# Altium schematic symbol library Capacitor.SchLib: 735 symbols (part 17 of 20)
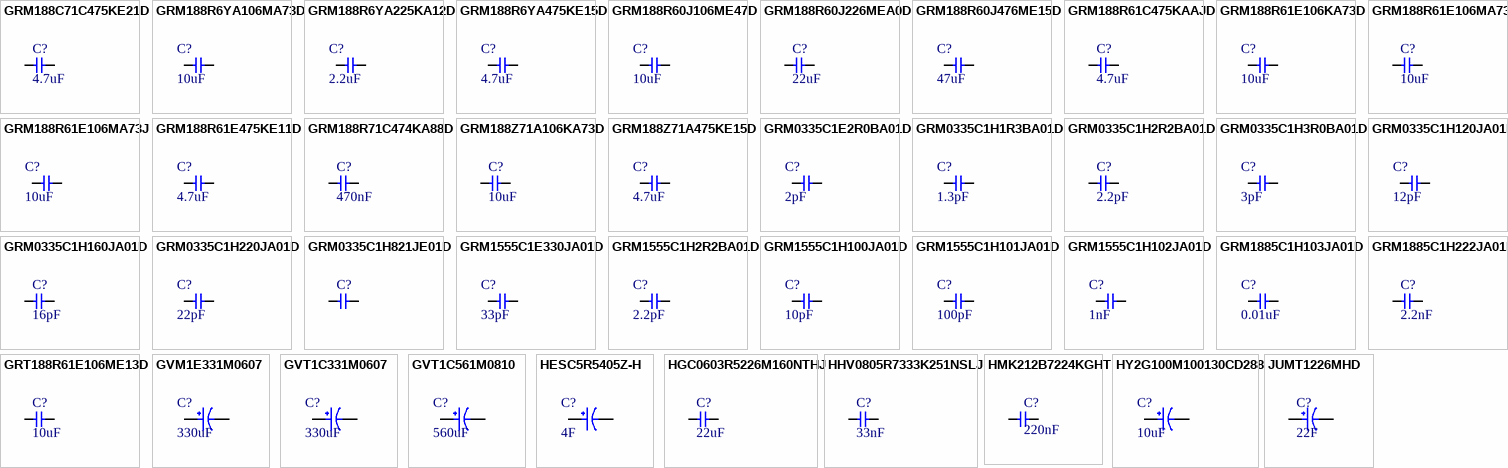
[diagram p34: symbols GRM188C71C475KE21D to JUMT1226MHD]

## GRM1555C1H101JA01D
designator C?, comment 100pF
CAP CER 100PF 50V C0G/NP0 0402; Manufacturer: Murata; Manufacturer Part Number: GRM1555C1H101JA01D; Material: Ceramic; Dielectric: C0G; Tolerance: 5%; Supplier 1: Mouser; RoHS: Yes; Category: Ceramic Capacitors; Stock 1: 2073105; Pricing 1: 1=0.10000, 10=0.01000, 50=0.01000, 100=0.00900, 500=0.00600, 1000=0.00500, 2500=0.00400, 10000=0.00300, 50000=0.00200 (USD); Mount: Surface Mount; Case/Package: 0402; Case Code (Metric): 1005; Case Code (Imperial): 0402; Min Operating Temperature: -55°C; Max Operating Temperature: 125°C; Voltage Rating: 50V; Capacitance: 100pF; Packaging: Tape and Reel; Package Quantity: 1; Voltage Rating (DC): 50V; Termination: SMD/SMT; Series: GRM; Construction: Flat; Voltage: 50V; Length: 1mm; Width: 0.02inch; Height: 0.5mm; Thickness: 0.022inch; Depth: 0.5mm; Radiation Hardening: No; REACH SVHC: No SVHC; Lead Free: Lead Free; RoHS Compliant: Yes; ComponentLink1URL: https://datasheet.ciiva.com/11786/0900766b80ef921d-11786069.pdf?src-supplier=RSComponents; ComponentLink1Description: https://datasheet.ciiva.com/11786/0900766b80ef921d-11786069.pdf?src-supplier=RSComponents; ComponentLink2URL: https://datasheet.ciiva.com/18184/getdatasheetpartid-199957-18184175.pdf?src-supplier=Verical; ComponentLink2Description: https://datasheet.ciiva.com/18184/getdatasheetpartid-199957-18184175.pdf?src-supplier=Verical; ComponentLink3URL: https://datasheet.ciiva.com/29200/453557-da-01-en-vs-kondensator-0402-29200111.pdf?src-supplier=Conrad; ComponentLink3Description: https://datasheet.ciiva.com/29200/453557-da-01-en-vs-kondensator-0402-29200111.pdf?src-supplier=Conrad; ComponentLink4URL: https://datasheet.ciiva.com/6271/partnumbering-e-01-6271071.pdf?src-supplier=Digi-Key; ComponentLink4Description: https://datasheet.ciiva.com/6271/partnumbering-e-01-6271071.pdf?src-supplier=Digi-Key; ComponentLink5URL: https://datasheet.ciiva.com/16440/product-16440566.pdf?src-supplier=Future+Electronics; ComponentLink5Description: https://datasheet.ciiva.com/16440/product-16440566.pdf?src-supplier=Future+Electronics; Supplier Part Number 1: 81-GRM1555C1H101JA1D; LCSC Part Number: C77177
footprint Cap-0402
pins: 1, 2

## GRM1555C1H102JA01D
designator C?, comment 1nF
CAP CER 1000PF 50V C0G/NP0 0402; Manufacturer: Murata; Manufacturer Part Number: GRM1555C1H102JA01D; Material: Ceramic; Tolerance: 5%; Dielectric: C0G; Insulation Resistance: 10GR; Temperature Coefficient: 30ppm/°C; Item Type: Capacitor; Supplier 1: Avnet; RoHS: Yes; Category: Ceramic Capacitors; Stock 1: 800000; Pricing 1: 10000=0.00648, 20000=0.00613, 40000=0.00578, 60000=0.00543, 80000=0.00508, 100000=0.00473, 1000000=0.00438 (USD); Mount: Surface Mount; Case/Package: 0402; Number of Pins: 2; Case Code (Metric): 1005; Case Code (Imperial): 0402; Dielectric Material: Ceramic; Min Operating Temperature: -55°C; Max Operating Temperature: 125°C; Package Quantity: 1; Capacitance: 1nF; Voltage Rating: 50V; Packaging: Tape and Reel; Voltage Rating (DC): 50V; Termination: SMD/SMT; Voltage: 50V; Series: GRM; Construction: Flat; Length: 1mm; Width: 0.5mm; Height: 0.5mm; Thickness: 0.022inch; Depth: 0.5mm; Size: 0.5mm; Radiation Hardening: No; Reach SVHC Compliant: Yes; Lead Free: Lead Free; RoHS Compliant: Yes; ComponentLink1URL: https://datasheet.ciiva.com/34302/1855908-34302849.pdf?src-supplier=Jameco; ComponentLink1Description: https://datasheet.ciiva.com/34302/1855908-34302849.pdf?src-supplier=Jameco; ComponentLink2URL: https://datasheet.ciiva.com/132/product-132800.pdf?src-supplier=Digi-Key; ComponentLink2Description: https://datasheet.ciiva.com/132/product-132800.pdf?src-supplier=Digi-Key; ComponentLink3URL: https://datasheet.ciiva.com/132/grm1555c1h102ja01-01-132799.pdf?src-supplier=Digi-Key; ComponentLink3Description: https://datasheet.ciiva.com/132/grm1555c1h102ja01-01-132799.pdf?src-supplier=Digi-Key; ComponentLink4URL: https://datasheet.ciiva.com/11786/0900766b807a1cab-11786727.pdf?src-supplier=RSComponents; ComponentLink4Description: https://datasheet.ciiva.com/11786/0900766b807a1cab-11786727.pdf?src-supplier=RSComponents; ComponentLink5URL: https://datasheet.ciiva.com/29200/453569-da-01-en-vs-kondensator-0402-29200121.pdf?src-supplier=Conrad; ComponentLink5Description: https://datasheet.ciiva.com/29200/453569-da-01-en-vs-kondensator-0402-29200121.pdf?src-supplier=Conrad; ComponentLink6URL: https://datasheet.ciiva.com/7828/4360-7828821.pdf?src-supplier=Element14; ComponentLink6Description: https://datasheet.ciiva.com/7828/4360-7828821.pdf?src-supplier=Element14; ComponentLink7URL: https://datasheet.ciiva.com/14116/grmseries-tc-hitype-eng-14116919.pdf?src-supplier=Distrelec; ComponentLink7Description: https://datasheet.ciiva.com/14116/grmseries-tc-hitype-eng-14116919.pdf?src-supplier=Distrelec; ComponentLink8URL: https://datasheet.ciiva.com/14116/grmseries-tc-hitype-eng-14116858.pdf?src-supplier=Distrelec; ComponentLink8Description: https://datasheet.ciiva.com/14116/grmseries-tc-hitype-eng-14116858.pdf?src-supplier=Distrelec; ComponentLink9URL: https://datasheet.ciiva.com/132/grm1555c1h102ja01-01-132801.pdf?src-supplier=Digi-Key; ComponentLink9Description: https://datasheet.ciiva.com/132/grm1555c1h102ja01-01-132801.pdf?src-supplier=Digi-Key; ComponentLink10URL: https://datasheet.ciiva.com/7828/1747436-7828822.pdf?src-supplier=Element14; ComponentLink10Description: https://datasheet.ciiva.com/7828/1747436-7828822.pdf?src-supplier=Element14; Supplier Part Number 1: GRM1555C1H102JA01D; LCSC Part Number: C76947
footprint Cap-0402
pins: 1, 2

## GRM1885C1H103JA01D
designator C?, comment 0.01uF
CAP CER 10000PF 50V C0G/NP0 0603; Manufacturer: Murata; Manufacturer Part Number: GRM1885C1H103JA01D; Material: Ceramic; Capacitance: 10nF; Tolerance: 5%; Dielectric: C0G; Supplier 1: RSComponents; RoHS: Yes; Category: Ceramic Capacitors; Stock 1: 80000; Pricing 1: 4000=0.03500, 8000=0.03200 (GBP); Mount: Surface Mount; Case/Package: 0603; Case Code (Metric): 1608; Case Code (Imperial): 0603; Min Operating Temperature: -55°C; Max Operating Temperature: 125°C; Packaging: Tape and Reel; Package Quantity: 4000; Voltage Rating: 50V; Voltage Rating (DC): 50V; Termination: SMD/SMT; Voltage: 50V; Series: GRM; Length: 1.6mm; Width: 0.8mm; Height: 0.8mm; Thickness: 0.035inch; Lead Pitch: 0.5mm; Depth: 0.8mm; REACH SVHC: No SVHC; Lead Free: Lead Free; RoHS Compliant: Yes; ComponentLink1URL: https://datasheet.ciiva.com/41860/partnumbering-e-01-41860759.pdf?src-supplier=Digi-Key; ComponentLink1Description: https://datasheet.ciiva.com/41860/partnumbering-e-01-41860759.pdf?src-supplier=Digi-Key; ComponentLink2URL: https://datasheet.ciiva.com/29537/partnumbering-e-01-29537910.pdf?src-supplier=Digi-Key; ComponentLink2Description: https://datasheet.ciiva.com/29537/partnumbering-e-01-29537910.pdf?src-supplier=Digi-Key; Supplier Part Number 1: 1449032
footprint Cap-0603
pins: 1, 2

## GRM1885C1H222JA01D
designator C?, comment 2.2nF
CAP CER 2200PF 50V C0G/NP0 0603; Manufacturer: Murata; Manufacturer Part Number: GRM1885C1H222JA01D; Item Type: Capacitors; Material: Ceramic; Tolerance: 5%; Dielectric: C0G; Insulation Resistance: 10GR; Temperature Coefficient: 30ppm/°C; Supplier: Mouser; LCSC Part Number: C77033; RoHS: Yes; Stock: 93842; Pricing: 1=0.1, 10=0.031, 50=0.031, 100=0.019, 1000=0.015, 10000=0.008 (USD); Mounting Technology: Surface Mount; Case/Package: 0603; Pins: 2; Case Code (Imperial): 0603; Case Code (Metric): 1608; Dielectric Material: Ceramic; Min Operating Temperature: -55°C; Max Operating Temperature: 125°C; Value: 2.2nF; Packaging: Tape and Reel; Voltage Rating: 50V; Voltage Rating (DC): 50V; Package Quantity: 1; Termination: SMD/SMT; Voltage: 50V; Series: GRM; Construction: Flat; Length: 1.6mm; Width: 0.031inch; Height: 0.8mm; Thickness: 0.035inch; Depth: 0.8mm; Reach SVHC Compliant: No; Lead Free: Lead Free; RoHS Compliant: Yes; ComponentLink1URL: https://datasheet.ciiva.com/11786/0900766b807a1cab-11786840.pdf?src-supplier=Rs; ComponentLink1Description: https://datasheet.ciiva.com/11786/0900766b807a1cab-11786840.pdf?src-supplier=Rs; ComponentLink2URL: https://datasheet.ciiva.com/3777/1632grm1885c1h222ja0123-3777835.pdf?src-supplier=Arrow+Electronics; ComponentLink2Description: https://datasheet.ciiva.com/3777/1632grm1885c1h222ja0123-3777835.pdf?src-supplier=Arrow+Electronics; ComponentLink3URL: https://datasheet.ciiva.com/6031/4360-6031797.pdf?src-supplier=Farnell; ComponentLink3Description: https://datasheet.ciiva.com/6031/4360-6031797.pdf?src-supplier=Farnell; ComponentLink4URL: https://datasheet.ciiva.com/7828/4360-7828918.pdf?src-supplier=Element14; ComponentLink4Description: https://datasheet.ciiva.com/7828/4360-7828918.pdf?src-supplier=Element14; ComponentLink5URL: https://datasheet.ciiva.com/133/partnumbering-e-01-133577.pdf?src-supplier=Digikey; ComponentLink5Description: https://datasheet.ciiva.com/133/partnumbering-e-01-133577.pdf?src-supplier=Digikey; ComponentLink6URL: https://datasheet.ciiva.com/133/partnumbering-e-01-133576.pdf?src-supplier=Digikey; ComponentLink6Description: https://datasheet.ciiva.com/133/partnumbering-e-01-133576.pdf?src-supplier=Digikey; ComponentLink7URL: https://datasheet.ciiva.com/133/partnumbering-e-01-133578.pdf?src-supplier=Digikey; ComponentLink7Description: https://datasheet.ciiva.com/133/partnumbering-e-01-133578.pdf?src-supplier=Digikey; ComponentLink8URL: https://datasheet.ciiva.com/7828/1747455-7828919.pdf?src-supplier=Element14; ComponentLink8Description: https://datasheet.ciiva.com/7828/1747455-7828919.pdf?src-supplier=Element14; ComponentLink9URL: https://datasheet.ciiva.com/7828/1747455-7828920.pdf?src-supplier=Element14; ComponentLink9Description: https://datasheet.ciiva.com/7828/1747455-7828920.pdf?src-supplier=Element14; ComponentLink10URL: https://datasheet.ciiva.com/11463/product-11463974.pdf?src-supplier=Avnet; ComponentLink10Description: https://datasheet.ciiva.com/11463/product-11463974.pdf?src-supplier=Avnet; ComponentLink11URL: https://datasheet.ciiva.com/2989/product-2989459.pdf?src-supplier=Avnet; ComponentLink11Description: https://datasheet.ciiva.com/2989/product-2989459.pdf?src-supplier=Avnet; ComponentLink12URL: https://datasheet.ciiva.com/29241/450664-da-01-en-vs-kondensator-0603-29241770.pdf?src-supplier=Conrad; ComponentLink12Description: https://datasheet.ciiva.com/29241/450664-da-01-en-vs-kondensator-0603-29241770.pdf?src-supplier=Conrad
footprint Cap-0603
pins: 1, 2

## GRT188R61E106ME13D
designator C?, comment 10uF
CAP CER 10UF 25V X5R 0603; Manufacturer: Murata; Manufacturer Part Number: GRT188R61E106ME13D; Item Type: Capacitors; Material: 4241ConductorMaterial; Tolerance: 20%; Supplier: Future Electronics; LCSC Part Number: C697423; RoHS: No; Stock: 444000; Pricing: 4000=0.0522, 8000=0.0514, 12000=0.0509, 20000=0.0503, 40000=0.049 (USD); Mounting Technology: Surface Mount; Case/Package: 0603; Case Code (Metric): 1608; Case Code (Imperial): 0603; Weight: 0.000917oz; Min Operating Temperature: -55°C; Max Operating Temperature: 85°C; Packaging: Cut Tape; Value: 10uF; Voltage Rating: 25V; Series: GRT; Termination: Standard; Voltage Rating (DC): 25V; Dielectric: X5R; Package Quantity: 4000; Length: 1.6mm; Width: 0.8mm; Height: 0.8mm; Ratings: AEC-Q200; RoHS Compliant: No; ComponentLink1URL: https://datasheet.octopart.com/GRT188R61E106ME13D-Murata-datasheet-149523595.pdf?src-supplier=Newark; ComponentLink1Description: https://datasheet.octopart.com/GRT188R61E106ME13D-Murata-datasheet-149523595.pdf?src-supplier=Newark; ComponentLink2URL: https://datasheet.octopart.com/GRT188R61E106ME13D-Murata-datasheet-82944876.pdf?src-supplier=Future+Electronics; ComponentLink2Description: https://datasheet.octopart.com/GRT188R61E106ME13D-Murata-datasheet-82944876.pdf?src-supplier=Future+Electronics; ComponentLink3URL: http://search.murata.co.jp/Ceramy/image/img/A01X/G101/ENG/GRT188R61E106ME13-01.pdf?src-supplier=Digikey; ComponentLink3Description: http://search.murata.co.jp/Ceramy/image/img/A01X/G101/ENG/GRT188R61E106ME13-01.pdf?src-supplier=Digikey; ComponentLink4URL: https://search.murata.co.jp/Ceramy/image/img/A01X/G101/ENG/GRT188R61E106ME13-01.pdf?src-supplier=Digikey; ComponentLink4Description: https://search.murata.co.jp/Ceramy/image/img/A01X/G101/ENG/GRT188R61E106ME13-01.pdf?src-supplier=Digikey; ComponentLink5URL: https://datasheet.octopart.com/GRT188R61E106ME13D-Murata-datasheet-165579666.pdf?src-supplier=TME; ComponentLink5Description: https://datasheet.octopart.com/GRT188R61E106ME13D-Murata-datasheet-165579666.pdf?src-supplier=TME
footprint Cap-0603
pins: 1, 2

## GVM1E331M0607
designator C?, comment 330uF
330uF ±20% 25V Aluminum Electrolytic Capacitors 2000hrs@105℃; Manufacturer: Honor Elec; Manufacturer Part Number: GVM1E331M0607; Package: SMD,D6.3xL7.7mm; Item Type: Capacitor; LCSC Part Number: C2980171
footprint GVM1E331M0607
pins: 1, 2

## GVT1C331M0607
designator C?, comment 330uF
330uF 16V ±20% SMD,D6.3xL7.7mm Aluminum Electrolytic Capacitors - SMD ROHS; Manufacturer: Honor Elec; Manufacturer Part Number: GVT1C331M0607; Package: SMD,D6.3xL7.7mm; LCSC Part Number: C2980164; Item Type: Capacitor; ComponentLink1Description: LCSC; ComponentLink1URL: https://www.lcsc.com/product-detail/Aluminum-Electrolytic-Capacitors-SMD_Honor-Elec-GVT1C331M0607_C2980164.html
footprint GVT1C331M0607
pins: 1, 2

## GVT1C561M0810
designator C?, comment 560uF
560uF 16V ±20% SMD,D8xL10.5mm Aluminum Electrolytic Capacitors - SMD ROHS; Manufacturer: Honor Elec; Manufacturer Part Number: GVT1C561M0810; Package: SMD,D8xL10.5mm; LCSC Part Number: C2980166; Item Type: Capacitor; ComponentLink1Description: LCSC; ComponentLink1URL: https://www.lcsc.com/product-detail/span-style-background-color-ff0-Aluminum-span-span-style-background-color-ff0-Electrolytic-span-span-style-background-color-ff0-Capacitors-span-span-style-background-color-ff0-SMD-span_Honor-Elec-GVT1C561M0810_C2980166.html
footprint GVT1C561M0810
pins: 1, 2

## HESC5R5405Z-H
designator C?, comment 4F
4F -20%~+80% 5.5V; Manufacturer: JGNE; Manufacturer Part Number: HESC5R5405Z-H; Package: Plug In; ComponentLink1Description: LCSC; ComponentLink1URL: https://item.szlcsc.com/3031082.html
footprint HESC5R5405Z-H
pins: 1, 2

## HGC0603R5226M160NTHJ
designator C?, comment 22uF
16V 22uF X5R ±20% 0603 Multilayer Ceramic Capacitors MLCC - SMD/SMT ROHS; Manufacturer: Chinocera; Manufacturer Part Number: HGC0603R5226M160NTHJ; Package: 0603; LCSC Part Number: C22367828; Item Type: Capacitor; ComponentLink1Description: LCSC; ComponentLink1URL: https://www.lcsc.com/product-detail/Multilayer-Ceramic-Capacitors-MLCC-SMD-SMT_Chinocera-HGC0603R5226M160NTHJ_C22367828.html
footprint Cap-0603
pins: 1, 2

## HHV0805R7333K251NSLJ
designator C?, comment 33nF
250V 33nF X7R 0805 Multilayer Ceramic Capacitors MLCC - SMD/SMT ROHS; Manufacturer: Chinocera; Manufacturer Part Number: HHV0805R7333K251NSLJ; Package: 0805; LCSC Part Number: C5186797; Item Type: Capacitor; ComponentLink1Description: LCSC; ComponentLink1URL: https://www.lcsc.com/product-detail/Multilayer-Ceramic-Capacitors-MLCC-SMD-SMT_Chinocera-HHV0805R7333K251NSLJ_C5186797.html
footprint Cap-0805 (SMD 0805)
pins: 1, 2

## HMK212B7224KGHT
designator C?, comment 220nF
CAP CER 0.22UF 100V X7R 0805; Item Type: Capacitor; Tolerance: 10%; LCSC Part Number: C2880358; ComponentLink1Description: LCSC; Supplier: Avnet; Supplier Part Number: HMK212B7224KGHT; RoHS: Yes; Category: Ceramic Capacitors; Stock: 138000; Pricing: 3000=0.05785, 6000=0.05655, 12000=0.05395, 18000=0.05265, 24000=0.04614 (USD); Mounting Technology: Surface Mount; Case/Package: 0805; Case Code (Imperial): 0805; Case Code (Metric): 2012; Min Operating Temperature: -55°C; Max Operating Temperature: 125°C; Value: 220nF; Packaging: Cut Tape; Voltage Rating: 100V; Voltage Rating (DC): 100V; Series: M; Length: 0.079inch; Width: 0.049inch; Thickness: 0.053inch; Ratings: AEC-Q200; Halogen Free: Halogen Free; RoHS Compliant: Yes; ComponentLink2URL: http://www.yuden.co.jp/ut/product/category/capacitor/putpdf/HMK212B7224KGHT.pdf?src-supplier=Avnet; ComponentLink2Description: http://www.yuden.co.jp/ut/product/category/capacitor/putpdf/HMK212B7224KGHT.pdf?src-supplier=Avnet; ComponentLink3URL: http://www.yuden.co.jp/productdata/catalog/en/mlcc_all_hq_e.pdf?src-supplier=Digi-Key; ComponentLink3Description: http://www.yuden.co.jp/productdata/catalog/en/mlcc_all_hq_e.pdf?src-supplier=Digi-Key; ComponentLink4URL: https://ds.yuden.co.jp/TYCOMPAS/ut/detail?pn=HMK212B7224KGHT  &amp;u=M&src-supplier=Digi-Key; ComponentLink4Description: https://ds.yuden.co.jp/TYCOMPAS/ut/detail?pn=HMK212B7224KGHT  &amp;u=M&src-supplier=Digi-Key; ComponentLink5URL: https://www.yuden.co.jp/productdata/catalog/mlcc06_hq_e.pdf?src-supplier=Digi-Key; ComponentLink5Description: https://www.yuden.co.jp/productdata/catalog/mlcc06_hq_e.pdf?src-supplier=Digi-Key; ComponentLink6URL: https://datasheet.octopart.com/HMK212B7224KGHT-Taiyo-Yuden-datasheet-154844355.pdf?src-supplier=Electro+Sonic; ComponentLink6Description: https://datasheet.octopart.com/HMK212B7224KGHT-Taiyo-Yuden-datasheet-154844355.pdf?src-supplier=Electro+Sonic
footprint Cap-0805 (SMD 0805)
pins: 1, 2

## HY2G100M100130CD288
designator C?, comment 10uF
10uF 400V 3.32Ω@100kHz ±20% 245mA@100kHz Plugin,D10xL13mm Aluminum Electrolytic Capacitors - Leaded ROHS; Manufacturer: HYNCDZ; Manufacturer Part Number: HY2G100M100130CD288; Package: Plugin,D10xL13mm; LCSC Part Number: C2841122; Item Type: Electrolytic Capacitor; ComponentLink1Description: LCSC; ComponentLink1URL: https://www.lcsc.com/product-detail/Aluminum-Electrolytic-Capacitors-Leaded_HYNCDZ-HY2G100M100130CD288_C2841122.html
footprint HY2G100M100130CD288
pins: 1, 2

## JUMT1226MHD
designator C?, comment 22F
CAP 22F 20% 2.7V T/H; Manufacturer: Nichicon; Manufacturer Part Number: JUMT1226MHD; Item Type: Capacitors; Supplier: Digikey; Supplier Part Number: 493-3296-ND; RoHS: Yes; Stock: 202; Pricing: 1=10.2, 10=7.172, 50=5.9434, 100=5.5593, 500=4.903, 1000=4.69759 (USD); ComponentLink1URL: https://datasheet.ciiva.com/4663/e-um-197115-4663491.pdf?src-supplier=Mouser; ComponentLink1Description: https://datasheet.ciiva.com/4663/e-um-197115-4663491.pdf?src-supplier=Mouser; ComponentLink2URL: https://datasheet.ciiva.com/3784/5electrolytic-double-layer-capacitors-e-3784061.pdf?src-supplier=Arrow+Electronics; ComponentLink2Description: https://datasheet.ciiva.com/3784/5electrolytic-double-layer-capacitors-e-3784061.pdf?src-supplier=Arrow+Electronics; ComponentLink3URL: https://datasheet.ciiva.com/11790/0900766b80ec956c-11790095.pdf?src-supplier=Rs; ComponentLink3Description: https://datasheet.ciiva.com/11790/0900766b80ec956c-11790095.pdf?src-supplier=Rs; ComponentLink4URL: https://datasheet.ciiva.com/15164/getdatasheetpartid-451591-15164678.pdf?src-supplier=Verical; ComponentLink4Description: https://datasheet.ciiva.com/15164/getdatasheetpartid-451591-15164678.pdf?src-supplier=Verical; ComponentLink5URL: https://datasheet.ciiva.com/2992/e-um-2992929.pdf?src-supplier=Avnet; ComponentLink5Description: https://datasheet.ciiva.com/2992/e-um-2992929.pdf?src-supplier=Avnet; ComponentLink6URL: https://datasheet.ciiva.com/238/e-um-238415.pdf?src-supplier=Digikey; ComponentLink6Description: https://datasheet.ciiva.com/238/e-um-238415.pdf?src-supplier=Digikey
footprint JUMT1226MHD
pins: 1, 2

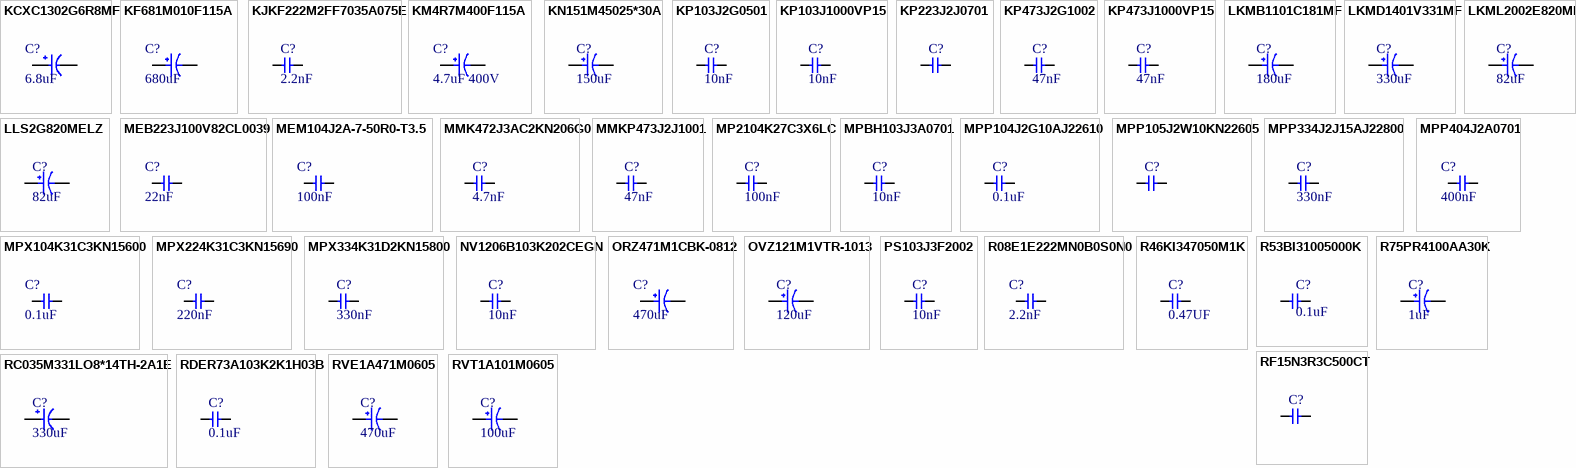
[diagram p15: symbols KCXC1302G6R8MF to RVT1A101M0605]

## KCXC1302G6R8MF
designator C?, comment 6.8uF
6.8uF 400V ±20% Plugin,D6.3xL13mm Aluminum Electrolytic Capacitors - Leaded ROHS; Manufacturer: Ymin; Manufacturer Part Number: KCXC1302G6R8MF; Package: Plugin,D6.3xL13mm; LCSC Part Number: C781275; Item Type: Capacitor; ComponentLink1Description: LCSC; ComponentLink1URL: https://www.lcsc.com/product-detail/Aluminum-Electrolytic-Capacitors-Leaded_Ymin-KCXC1302G6R8MF_C781275.html
footprint KCXC1302G6R8MF
pins: 1, 2

## KF681M010F115A
designator C?, comment 680uF
680uF 10V ±20% Plugin,D8xL11.5mm Aluminum Electrolytic Capacitors - Leaded ROHS; Manufacturer: Capxon International Elec; Manufacturer Part Number: KF681M010F115A; Package: Plugin,D8xL11.5mm; LCSC Part Number: C89787; Item Type: Electrolytic Capacitor; ComponentLink1Description: LCSC; ComponentLink1URL: https://www.lcsc.com/product-detail/Aluminum-Electrolytic-Capacitors-Leaded_Capxon-International-Elec-KF681M010F115A_C89787.html
footprint KF681M010F115A
pins: 1, 2

## KJKF222M2FF7035A075E
designator C?, comment 2.2nF
2.2nF ±20% Y2 300V Plugin,P=7.5mm Safety Capacitors ROHS; Manufacturer: KNSCHA; Manufacturer Part Number: KJKF222M2FF7035A075E; Supplier: LCSC; LCSC Part Number: C2803195; RoHS: No; Item Type: Capacitor
footprint KJKF222M2FF7035A075E
pins: 1, 2

## KM4R7M400F115A
designator C?, comment 4.7uF 400V
4.7uF 400V ±20% Plugin,D8xL11.5mm Aluminum Electrolytic Capacitors - Leaded ROHS; Manufacturer: Capxon International Elec; Manufacturer Part Number: KM4R7M400F115A; ComponentLink2URL: https://www.lcsc.com/product-detail/Aluminum-Electrolytic-Capacitors-Leaded_Capxon-International-Elec-KM4R7M400F115A_C59418.html; ComponentLink2Description: LCSC; LCSC Part Number: C59418; Item Type: Capacitor; Package: Plugin,D8xL11.5mm
footprint Plugin,D8xL11.5mm
pins: 1, 2

## KN151M45025*30A
designator C?, comment 150uF
20% 900mA@120Hz 10mm 450V 150uF Plugin,D25xL30mm Horn-Type Electrolytic Capacitors ROHS; Manufacturer: KFSON; Manufacturer Part Number: KN151M45025*30A; Package: Plugin,D25xL30mm; LCSC Part Number: C513373; Item Type: Capacitor; ComponentLink1Description: LCSC; ComponentLink1URL: https://www.lcsc.com/product-detail/Horn-Type-Electrolytic-Capacitors_KFSON-KN151M45025-30A_C513373.html
footprint KN151M45025*30A
pins: 1, 2

## KP103J2G0501
designator C?, comment 10nF
10nF -40℃~+100℃ ±5% 400V Plugin,P=5mm Polypropylene Film Capacitors (CBB) ROHS; Manufacturer: KYET; Manufacturer Part Number: KP103J2G0501; Package: Plugin,P=5mm; LCSC Part Number: C3019055; Item Type: Capacitor; ComponentLink1Description: LCSC; ComponentLink1URL: https://www.lcsc.com/product-detail/Polypropylene-Film-Capacitors-CBB_KYET-KP103J2G0501_C3019055.html
footprint KP103J2G0501
pins: 1, 2

## KP103J1000VP15
designator C?, comment 10nF
10nF -40℃~+105℃ ±5% 1kV Plugin,P=15mm Polypropylene Film Capacitors (CBB) ROHS; Manufacturer: KYET; Manufacturer Part Number: KP103J1000VP15; Package: Plugin,P=15mm; LCSC Part Number: C390160; Item Type: Capacitor; ComponentLink1Description: LCSC; ComponentLink1URL: https://www.lcsc.com/product-detail/Polypropylene-Film-Capacitors-CBB_KYET-KP103J1000VP15_C390160.html
footprint KP103J1000VP15
pins: 1, 2

## KP223J2J0701
designator C?
22nF -40℃~+100℃ ±5% 630V Plugin,P=7.5mm Polypropylene Film Capacitors (CBB) ROHS; Manufacturer: KYET; Manufacturer Part Number: KP223J2J0701; Package: Plugin,P=7.5mm; LCSC Part Number: C390073; Item Type: Capacitor; ComponentLink1Description: LCSC; ComponentLink1URL: https://www.lcsc.com/product-detail/Polypropylene-Film-Capacitors-CBB_KYET-KP223J2J0701_C390073.html
footprint KP223J2J0701
pins: 1, 2

## KP473J2G1002
designator C?, comment 47nF
47nF -40℃~+100℃ ±5% 400V Plugin,P=10mm Polypropylene Film Capacitors (CBB) ROHS; Manufacturer: KYET; Manufacturer Part Number: KP473J2G1002; Package: Plugin,P=10mm; LCSC Part Number: C3019043; Item Type: Capacitor; ComponentLink1Description: LCSC; ComponentLink1URL: https://www.lcsc.com/product-detail/Polypropylene-Film-Capacitors-CBB_KYET-KP473J2G1002_C3019043.html
footprint KP104J2G1016
pins: 1, 2

## KP473J1000VP15
designator C?, comment 47nF
47nF -40℃~+105℃ ±5% 1kV Plugin,P=15mm Polypropylene Film Capacitors (CBB) ROHS; Manufacturer: KYET; Manufacturer Part Number: KP473J1000VP15; Package: Plugin,P=15mm; LCSC Part Number: C390164; Item Type: Capacitors; ComponentLink1Description: LCSC; ComponentLink1URL: https://www.lcsc.com/product-detail/Polypropylene-Film-Capacitors-CBB_KYET-KP473J1000VP15_C390164.html
footprint KP473J1000VP15
pins: 1, 2

## LKMB1101C181MF
designator C?, comment 180uF
180uF 16V ±20% Plugin,D5xL11mm Aluminum Electrolytic Capacitors - Leaded ROHS; Manufacturer: Ymin; Manufacturer Part Number: LKMB1101C181MF; Supplier: LCSC; LCSC Part Number: C442570; RoHS: No; Item Type: Capacitor
footprint Plugin,D5xL11mm
pins: 1, 2

## LKMD1401V331MF
designator C?, comment 330uF
330uF 35V 90mΩ@100kHz ±20% 1.33A@100kHz Plugin,D8xL14mm Aluminum Electrolytic Capacitors - Leaded ROHS; Manufacturer: Ymin; Manufacturer Part Number: LKMD1401V331MF; Package: Plugin,D8xL14mm; LCSC Part Number: C442875; Item Type: Capacitor; ComponentLink1Description: LCSC; ComponentLink1URL: https://www.lcsc.com/product-detail/Aluminum-Electrolytic-Capacitors-Leaded_Ymin-LKMD1401V331MF_C442875.html
footprint LKMD1401V331MF
pins: 1, 2

## LKML2002E820MF
designator C?, comment 82uF
82uF 250V 1.35Ω@100kHz ±20% 1.27A@100kHz Plugin,D12.5xL20mm Aluminum Electrolytic Capacitors - Leaded ROHS; Manufacturer: Ymin; Manufacturer Part Number: LKML2002E820MF; Package: Plugin,D12.5xL20mm; LCSC Part Number: C443261; Item Type: Capacitor; ComponentLink1Description: LCSC; ComponentLink1URL: https://www.lcsc.com/product-detail/Aluminum-Electrolytic-Capacitors-Leaded_Ymin-LKML2002E820MF_C443261.html
footprint LKML2002E820MF
pins: 1, 2

## LLS2G820MELZ
designator C?, comment 82uF
CAP ALUM 82UF 20% 400V SNAP TH; Manufacturer: Nichicon; Manufacturer Part Number: LLS2G820MELZ; Item Type: Capacitor; Supplier: Mouser; LCSC Part Number: C2757944; RoHS: Yes; Stock: 93; Pricing: 1=3.28, 10=2.24, 50=2.05, 100=1.69, 1000=1.37, 10000=1.26 (USD); ComponentLink1URL: https://datasheet.ciiva.com/117/e-ls-117372.pdf?src-supplier=Digikey; ComponentLink1Description: https://datasheet.ciiva.com/117/e-ls-117372.pdf?src-supplier=Digikey; ComponentLink2URL: https://datasheet.ciiva.com/11684/e-ls-11684296.pdf?src-supplier=Avnet; ComponentLink2Description: https://datasheet.ciiva.com/11684/e-ls-11684296.pdf?src-supplier=Avnet
footprint LLS2G820MELZ
pins: 1, 2

## MEB223J100V82CL0039
designator C?, comment 22nF
±5% 100V 22nF -40℃~+110℃ Metallized Polyester Plugin,P=5mm Film Capacitors ROHS; Manufacturer: KNSCHA; Manufacturer Part Number: MEB223J100V82CL0039; Package: Plugin,P=5mm; LCSC Part Number: C2833307; Item Type: Capacitors; ComponentLink1Description: LCSC; ComponentLink1URL: https://www.lcsc.com/product-detail/Film-Capacitors_KNSCHA-MEB223J100V82CL0039_C2833307.html
footprint MEB223J100V82CL0039
pins: 1, 2

## MEM104J2A-7-50R0-T3.5
designator C?, comment 100nF
100nF ±5% 100V Plugin,P=5mm Polypropylene Film Capacitors (CBB) ROHS; Manufacturer: Hongzhi Elec; Manufacturer Part Number: MEM104J2A-7-50R0-T3.5; Package: Plugin,P=5mm; LCSC Part Number: C333838; Item Type: Capacitor; ComponentLink1Description: LCSC; ComponentLink1URL: https://www.lcsc.com/product-detail/Polypropylene-Film-Capacitors-span-style-background-color-ff0-CBB-span_Hongzhi-Elec-MEM104J2A-7-50R0-T3-5_C333838.html
footprint MEM104J2A-7-50R0-T3.5
pins: 1, 2

## MMK472J3AC2KN206G0
designator C?, comment 4.7nF
4.7nF -40℃~+105℃ ±5% 1kV Plugin,P=10mm Polypropylene Film Capacitors (CBB) ROHS; Manufacturer: KNSCHA; Manufacturer Part Number: MMK472J3AC2KN206G0; Package: Plugin,P=10mm; LCSC Part Number: C2998032; Item Type: Capacitor; ComponentLink1Description: LCSC; ComponentLink1URL: https://www.lcsc.com/product-detail/Polypropylene-Film-Capacitors-CBB_KNSCHA-MMK472J3AC2KN206G0_C2998032.html
footprint MMK472J3AC2KN206G0
pins: 1, 2

## MMKP473J2J1001
designator C?, comment 47nF
47nF -40℃~+105℃ ±5% 630V Plugin,P=10mm Polypropylene Film Capacitors (CBB) ROHS; Manufacturer: KYET; Manufacturer Part Number: MMKP473J2J1001; Supplier: LCSC; LCSC Part Number: C484939; Item Type: Capacitor; Stock: 4295; Pricing: 5=0.1166, 50=0.0957, 150=0.0852, 500=0.0684, 2500=0.0622, 5000=0.059 (USD); ComponentLink1Description: New link; ComponentLink1URL: https://www.lcsc.com/product-detail/Polypropylene-Film-Capacitors-CBB_KYET-MMKP473J2J1001_C484939.html
footprint MMKP473J2J1001
pins: 1, 2

## MP2104K27C3X6LC
designator C?, comment 100nF
100nF ±10% X2 275V Plugin,P=10mm Safety Capacitors ROHS; Manufacturer: SRD(Shenzhen Sincerity Tech); Manufacturer Part Number: MP2104K27C3X6LC; Package: Plugin,P=10mm; LCSC Part Number: C105759; Item Type: Capacitor; ComponentLink1Description: LCSC; ComponentLink1URL: https://www.lcsc.com/product-detail/Safety-Capacitors_SRD-Shenzhen-Sincerity-Tech-MP2104K27C3X6LC_C105759.html
footprint MP2104K27C3X6LC
pins: 1, 2

## MPBH103J3A0701
designator C?, comment 10nF
10nF -40℃~+100℃ ±5% 1kV Through Hole,P=7.5mm Film Capacitors RoHS; Manufacturer: KYET; Manufacturer Part Number: MPBH103J3A0701; Package: Through Hole,P=7.5mm; LCSC Part Number: C2928848; Item Type: Capacitor; ComponentLink1Description: LCSC; ComponentLink1URL: https://www.lcsc.com/product-detail/C2928848.html
footprint MPBH103J3A0701
pins: 1, 2

## MPP104J2G10AJ22610
designator C?, comment 0.1uF
0.1uF -40℃~+105℃ ±5% 400V Plugin,P=10mm Polypropylene Film Capacitors (CBB) ROHS; Manufacturer: KNSCHA; Manufacturer Part Number: MPP104J2G10AJ22610; Package: Plugin,P=10mm; LCSC Part Number: C5263846; Item Type: Capacitor; ComponentLink1Description: LCSC; ComponentLink1URL: https://www.lcsc.com/product-detail/Polypropylene-Film-Capacitors-CBB_KNSCHA-MPP104J2G10AJ22610_C5263846.html
footprint MPP104J2G10AJ22610
pins: 1, 2

## MPP105J2W10KN22605
designator C?
1uF -40℃~+105℃ ±5% 450V Plugin,P=10mm Polypropylene Film Capacitors (CBB) ROHS; Manufacturer: KNSCHA; Manufacturer Part Number: MPP105J2W10KN22605; Supplier: LCSC; LCSC Part Number: C2686214; RoHS: No; Item Type: Capacitor
footprint MPP105J2W10KN22605
pins: 1, 2

## MPP334J2J15AJ22800
designator C?, comment 330nF
330nF -40℃~+105℃ ±5% 630V Plugin,P=15mm Polypropylene Film Capacitors (CBB) ROHS; Manufacturer: KNSCHA; Manufacturer Part Number: MPP334J2J15AJ22800; Supplier: LCSC; LCSC Part Number: C506837; RoHS: No; Item Type: Capacitors
footprint MPP334J2J15AJ22800
pins: 1, 2

## MPP404J2A0701
designator C?, comment 400nF
400nF -40℃~+105℃ ±5% 100V Plugin,P=7.5mm Polypropylene Film Capacitors (CBB) ROHS; Manufacturer: KYET; Manufacturer Part Number: MPP404J2A0701; Package: Plugin,P=7.5mm; LCSC Part Number: C484926; Item Type: Capacitor; ComponentLink1Description: LCSC; ComponentLink1URL: https://lcsc.com/product-detail/Polypropylene-Film-Capacitors-CBB_KYET-MPP404J2A0701_C484926.html
footprint MPP404J2A0701
pins: 1, 2

## MPX104K31C3KN15600
designator C?, comment 0.1uF
100nF ±10% X2 Plugin,P=10mm Suppression Capacitors ROHS; Manufacturer: KNSCHA; Manufacturer Part Number: MPX104K31C3KN15600; Package: Plugin,P=10mm; LCSC Part Number: C489079; Item Type: Capacitor; ComponentLink1Description: LCSC; ComponentLink1URL: https://www.lcsc.com/product-detail/Suppression-Capacitors_KNSCHA-MPX104K31C3KN15600_C489079.html
footprint MPX104K31C3KN15600
pins: 1, 2

## MPX224K31C3KN15690
designator C?, comment 220nF
220nF ±10% X2 Plugin,P=10mm Suppression Capacitors ROHS; Manufacturer: KNSCHA; Manufacturer Part Number: MPX224K31C3KN15690; Package: Plugin,P=10mm; LCSC Part Number: C504197; Item Type: Suppression Capacitor; ComponentLink1Description: LCSC; ComponentLink1URL: https://www.lcsc.com/product-detail/Suppression-Capacitors_KNSCHA-MPX224K31C3KN15690_C504197.html
footprint MPX224K31C3KN15690
pins: 1, 2

## MPX334K31D2KN15800
designator C?, comment 330nF
330nF ±10% X2 Plugin,P=15mm Safety Capacitors ROHS; Manufacturer: KNSCHA; Manufacturer Part Number: MPX334K31D2KN15800; Package: Plugin,P=15mm; LCSC Part Number: C504201; Item Type: Capacitor; ComponentLink1Description: LCSC; ComponentLink1URL: https://www.lcsc.com/product-detail/Safety-Capacitors_KNSCHA-MPX334K31D2KN15800_C504201.html
footprint MPX334K31D2KN15800
pins: 1, 2

## NV1206B103K202CEGN
designator C?, comment 10nF
2kV 10nF ±10% 1206 Multilayer Ceramic Capacitors MLCC - SMD/SMT ROHS; Manufacturer: HUI JU; Manufacturer Part Number: NV1206B103K202CEGN; Package: 1206; LCSC Part Number: C976252; Item Type: Capacitor; ComponentLink1Description: LCSC; ComponentLink1URL: https://www.lcsc.com/product-detail/Multilayer-Ceramic-Capacitors-MLCC-SMD-SMT_HUI-JU-NV1206B103K202CEGN_C976252.html
footprint Cap-1206 (SMD 1206)
pins: 1, 2

## ORZ471M1CBK-0812
designator C?, comment 470uF
Cap Alum 470UF 16V 20% 2000LHRS 8 X 12; Manufacturer: Lelon; Manufacturer Part Number: ORZ471M1CBK-0812; Item Type: Capacitor; Supplier 1: Mouser; RoHS: Yes; Category: Uncategorized; Case/Package: Aluminum; Min Operating Temperature: -55°C; Max Operating Temperature: 105°C; Value: 470uF; Package Quantity: 500; Packaging: Bulk; Voltage Rating: 16V; Voltage Rating (DC): 16V; Tolerance: 20%; Termination: Radial; Length: 12mm; Lead Pitch: 3.5mm; ComponentLink1URL: http://www.lelon.com.tw/down.php?f=/file/3.pdf&n=OCRZ.pdf&src-supplier=Mouser; ComponentLink1Description: http://www.lelon.com.tw/down.php?f=/file/3.pdf&n=OCRZ.pdf&src-supplier=Mouser; Supplier Part Number 1: 140-ORZ471M1CBK0812; LCSC Part Number: C311633
footprint ORZ471M1CBK-0812
pins: 1, 2

## OVZ121M1VTR-1013
designator C?, comment 120uF
35V 120uF ±20% 4.4A@100kHz SMD,D10xL12.6mm Polymer Aluminum Capacitors ROHS; Manufacturer: Lelon; Manufacturer Part Number: OVZ121M1VTR-1013; Package: SMD,D10xL12.6mm; LCSC Part Number: C250089; Item Type: Capacitor; ComponentLink1Description: LCSC; ComponentLink1URL: https://www.lcsc.com/product-detail/Polymer-Aluminum-Capacitors_Lelon-OVZ121M1VTR-1013_C250089.html
footprint OVZ121M1VTR-1013
pins: 1, 2

## PS103J3F2002
designator C?, comment 10nF
10nF -40℃~+100℃ ±5% 2kV Plugin,P=20mm Polypropylene Film Capacitors (CBB) ROHS; Manufacturer: KYET; Manufacturer Part Number: PS103J3F2002; Package: Plugin,P=20mm; LCSC Part Number: C524425; Item Type: Capacitor; ComponentLink1Description: LCSC; ComponentLink1URL: https://www.lcsc.com/product-detail/Polypropylene-Film-Capacitors-CBB_KYET-PS103J3F2002_C524425.html
footprint PS103J3F2002
pins: 1, 2

## R08E1E222MN0B0S0N0
designator C?, comment 2.2nF
±20% 2.2nF Y5U 2kV Plugin,P=7.5mm Ceramic Disc Capacitors ROHS; Manufacturer: STE; Manufacturer Part Number: R08E1E222MN0B0S0N0; Package: Plugin,P=7.5mm; LCSC Part Number: C2914748; Item Type: Ceramic Disc Capacitor; ComponentLink1Description: LCSC; ComponentLink1URL: https://www.lcsc.com/product-detail/Ceramic-Disc-Capacitors_STE-Songtian-Elec-R08E1E222MN0B0S0N0_C2914748.html
footprint R08E1E222MN0B0S0N0
pins: 1, 2

## R46KI347050M1K
designator C?, comment 0.47UF
CAP FILM 0.47UF 10% 560VDC RAD; Manufacturer: KEMET; Manufacturer Part Number: R46KI347050M1K; Item Type: Capacitor; Lead Length: 25mm; Supplier: Mouser; LCSC Part Number: C696791; RoHS: Yes; Stock: 2256; Pricing: 1=0.88, 10=0.633, 50=0.633, 100=0.493, 1000=0.421, 10000=0.322 (USD); Pins: 2NUMBER; ComponentLink1URL: http://components.arrow.com/part/dataview/47471301S8592209N7429?src-supplier=Arrow+Electronics; ComponentLink1Description: http://components.arrow.com/part/dataview/47471301S8592209N7429?src-supplier=Arrow+Electronics; ComponentLink2URL: http://datasheet.octopart.com/R46KI347050M1K-Kemet-datasheet-5313608.pdf?src-supplier=Mouser; ComponentLink2Description: http://datasheet.octopart.com/R46KI347050M1K-Kemet-datasheet-5313608.pdf?src-supplier=Mouser; ComponentLink3URL: https://datasheet.octopart.com/R46KI347050M1K-Kemet-datasheet-5313608.pdf?src-supplier=Element14; ComponentLink3Description: https://datasheet.octopart.com/R46KI347050M1K-Kemet-datasheet-5313608.pdf?src-supplier=Element14; ComponentLink4URL: http://datasheet.octopart.com/R46KI347050M1K-Kemet-datasheet-5313608.pdf?src-supplier=Newark; ComponentLink4Description: http://datasheet.octopart.com/R46KI347050M1K-Kemet-datasheet-5313608.pdf?src-supplier=Newark; ComponentLink5URL: http://datasheet.octopart.com/R46KI347050M1K-Kemet-datasheet-5313608.pdf?src-supplier=Distrelec; ComponentLink5Description: http://datasheet.octopart.com/R46KI347050M1K-Kemet-datasheet-5313608.pdf?src-supplier=Distrelec; ComponentLink6URL: https://api.kemet.com/component-edge/download/datasheet/R46KI347050M1K.pdf?src-supplier=Digikey; ComponentLink6Description: https://api.kemet.com/component-edge/download/datasheet/R46KI347050M1K.pdf?src-supplier=Digikey; ComponentLink7URL: http://datasheet.octopart.com/R46KI347050M1K-Kemet-datasheet-5313608.pdf?src-supplier=Avnet; ComponentLink7Description: http://datasheet.octopart.com/R46KI347050M1K-Kemet-datasheet-5313608.pdf?src-supplier=Avnet; ComponentLink8URL: http://datasheet.octopart.com/R46KI347050M1K-Kemet-datasheet-5313608.pdf?src-supplier=Farnell; ComponentLink8Description: http://datasheet.octopart.com/R46KI347050M1K-Kemet-datasheet-5313608.pdf?src-supplier=Farnell; ComponentLink9URL: http://datasheet.octopart.com/R46KI347050M1K-Kemet-datasheet-5313608.pdf?src-supplier=Arrow+Electronics; ComponentLink9Description: http://datasheet.octopart.com/R46KI347050M1K-Kemet-datasheet-5313608.pdf?src-supplier=Arrow+Electronics; ComponentLink10URL: http://datasheet.octopart.com/R46KI347050M1K-Kemet-datasheet-5313608.pdf?src-supplier=Onlinecomponents.com; ComponentLink10Description: http://datasheet.octopart.com/R46KI347050M1K-Kemet-datasheet-5313608.pdf?src-supplier=Onlinecomponents.com; ComponentLink11URL: http://datasheet.octopart.com/R46KI347050M1K-Kemet-datasheet-5313608.pdf?src-supplier=Verical; ComponentLink11Description: http://datasheet.octopart.com/R46KI347050M1K-Kemet-datasheet-5313608.pdf?src-supplier=Verical; ComponentLink12URL: http://datasheet.octopart.com/R46KI347050M1K-Kemet-datasheet-5313608.pdf?src-supplier=LCSC; ComponentLink12Description: http://datasheet.octopart.com/R46KI347050M1K-Kemet-datasheet-5313608.pdf?src-supplier=LCSC; ComponentLink13URL: https://datasheet.octopart.com/R46KI347050M1K-Kemet-datasheet-67199277.pdf?src-supplier=TME; ComponentLink13Description: https://datasheet.octopart.com/R46KI347050M1K-Kemet-datasheet-67199277.pdf?src-supplier=TME; ComponentLink14URL: http://datasheet.octopart.com/R46KI347050M1K-Kemet-datasheet-5313608.pdf?src-supplier=Electro+Sonic; ComponentLink14Description: http://datasheet.octopart.com/R46KI347050M1K-Kemet-datasheet-5313608.pdf?src-supplier=Electro+Sonic
footprint R46KI347050M1K
pins: 1, 2

## R53BI31005000K
designator C?, comment 0.1uF
CAP FILM 0.1UF 10% 800VDC RADIAL; Item Type: Capacitor; ComponentLink1Description: LCSC; Supplier: Mouser; Supplier Part Number: 80-R53BI31005000K; RoHS: No; Stock: 1560; Pricing: 1=0.79, 10=0.503, 50=0.503, 100=0.429, 1000=0.295, 10000=0.256 (USD)
footprint R53BI31005000K
pins: 1, 2

## R75PR4100AA30K
designator C?, comment 1uF
Cap Film 0.47uF 305VAC PET 20% (26.5 X 8.5 X 16.5mm) Radial 22.5mm 105°C Bulk; Manufacturer: KEMET; Manufacturer Part Number: R75PR4100AA30K; Item Type: Capacitors; Dielectric Material: Polyester; Value: 470nF; Ratings: AEC-Q200,X2; Supplier: Mouser; Supplier Part Number: 80-R75PR4100AA30K; RoHS: Yes; Stock: 3429; Pricing: 1=1.83, 10=1.31, 50=1.03, 100=0.854, 1000=0.846, 10000=0.846 (USD); ComponentLink1URL: https://datasheet.ciiva.com/13404/kem-f3106-r75-364632-13404539.pdf?src-supplier=Mouser; ComponentLink1Description: https://datasheet.ciiva.com/13404/kem-f3106-r75-364632-13404539.pdf?src-supplier=Mouser; Category: Film Capacitors; Case/Package: Radial; Series: B32933; Termination: PC Pins; RoHS Compliant: Yes; ComponentLink2URL: https://en.tdk.eu/inf/20/20/ds/MKT_B32932_936.pdf?src-supplier=Digikey; ComponentLink2Description: https://en.tdk.eu/inf/20/20/ds/MKT_B32932_936.pdf?src-supplier=Digikey
footprint R75PR4100AA30K
pins: 1, 2

## RC035M331LO8*14TH-2A1E
designator C?, comment 330uF
330uF 35V ±20% 860mA@100kHz Plugin,D8xL14mm Aluminum Electrolytic Capacitors - Leaded ROHS; Manufacturer: BERYL Electronic Tech; Manufacturer Part Number: RC035M331LO8*14TH-2A1E; Package: Plugin,D8xL14mm; LCSC Part Number: C357626; Item Type: Capacitor; ComponentLink1Description: LCSC; ComponentLink1URL: https://www.lcsc.com/product-detail/Aluminum-Electrolytic-Capacitors-Leaded_BERYL-Electronic-Tech-RC035M331LO8-14TH-2A1E_C357626.html
footprint RC035M331LO8*14TH-2A1E
pins: 1, 2

## RDER73A103K2K1H03B
designator C?, comment 0.1uF
CAP CER 10000PF 1KV X7R RADIAL; Manufacturer: Murata; Manufacturer Part Number: RDER73A103K2K1H03B; Item Type: Capacitors; Material: 4241ConductorMaterial; Dielectric: 1511DielectricType; Supplier: Digikey; LCSC Part Number: C162686; RoHS: Yes; Stock: 415; Pricing: 1=0.82, 10=0.574, 50=0.483, 100=0.3934, 500=0.3278, 1000=0.27604, 2500=0.25879, 5000=0.24154 (USD); Voltage Rating (DC): 1kV; Width: 4mm; Height: 6mm; ComponentLink1URL: https://search.murata.co.jp/Ceramy/image/img/A01X/partnumbering_e_03.pdf?src-supplier=Digikey; ComponentLink1Description: https://search.murata.co.jp/Ceramy/image/img/A01X/partnumbering_e_03.pdf?src-supplier=Digikey; ComponentLink2URL: https://datasheet.octopart.com/RDER73A103K2K1H03B-Murata-datasheet-166166232.pdf?src-supplier=TME; ComponentLink2Description: https://datasheet.octopart.com/RDER73A103K2K1H03B-Murata-datasheet-166166232.pdf?src-supplier=TME
footprint RDER73A103K2K1H03B
pins: 1, 2

## RF15N3R3C500CT
designator C?
CAP CER 3.3PF 50V C0G/NP0 0402; Manufacturer: Walsin Tech Corp; Manufacturer Part Number: RF15N3R3C500CT; Item Type: Capacitor; Package: 0402; LCSC Part Number: C172822; ComponentLink1Description: LCSC; ComponentLink1URL: https://www.lcsc.com/product-detail/Multilayer-Ceramic-Capacitors-MLCC-SMD-SMT_Walsin-Tech-Corp-RF15N3R3C500CT_C172822.html
footprint Cap-0402
pins: 1, 2

## RVE1A471M0605
designator C?, comment 470uF
470uF 10V 220mA@120Hz 450mΩ ±20% SMD,D6.3xL5.8mm Aluminum Electrolytic Capacitors - SMD ROHS; Manufacturer: Roqang; Manufacturer Part Number: RVE1A471M0605; Supplier: LCSC; LCSC Part Number: C7465562; RoHS: No; ComponentLink1Description: LCSC; ComponentLink1URL: https://www.lcsc.com/product-detail/Aluminum-Electrolytic-Capacitors-SMD_ROQANG-RVE1A471M0605_C7465562.html
footprint RVE1A471M0605
pins: 1, 2

## RVT1A101M0605
designator C?, comment 100uF
100uF 10V 55mA@120Hz ±20% SMD,D6.3xL5.4mm Aluminum Electrolytic Capacitors - SMD ROHS; Manufacturer: ROQANG; Manufacturer Part Number: RVT1A101M0605; Package: SMD,D6.3xL5.4mm; LCSC Part Number: C72474; Item Type: Capacitor; ComponentLink1Description: LCSC; ComponentLink1URL: https://www.lcsc.com/product-detail/Aluminum-Electrolytic-Capacitors-SMD_ROQANG-RVT1A101M0605_C72474.html
footprint RVT1A101M0605
pins: 1, 2

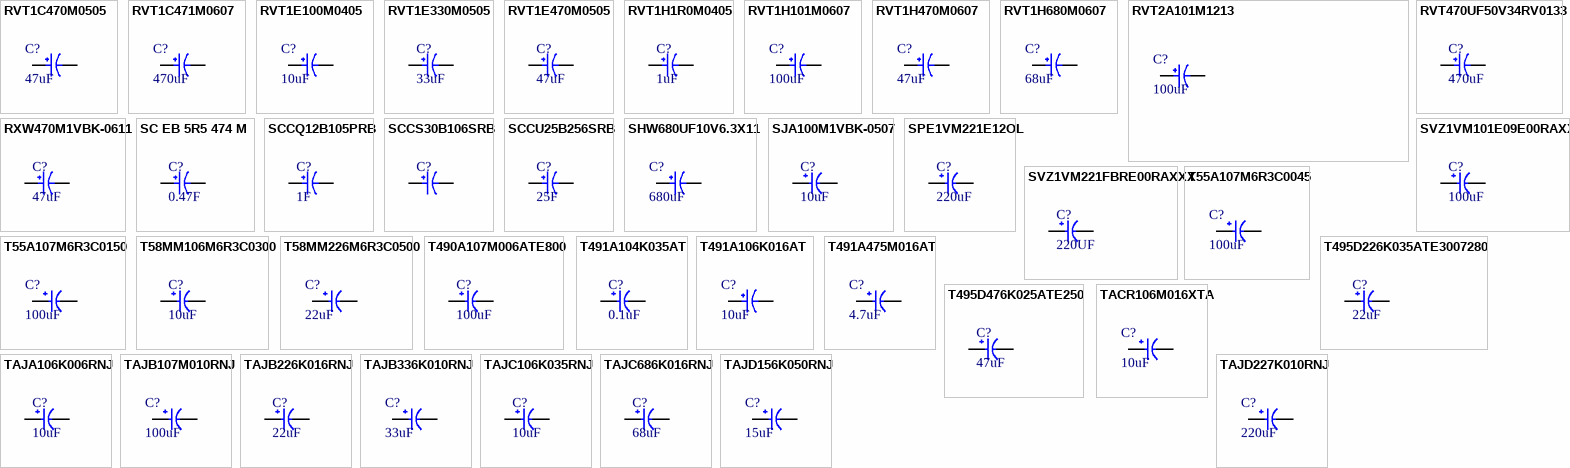
[diagram p16: symbols RVT1C470M0505 to TAJD227K010RNJ]

## RVT1C470M0505
designator C?, comment 47uF
-45℃~+105℃ 2000hrs@105℃ 47uF 5.4mm 16V 5mm ±20% SMD,D5xL5.4mm Aluminum Electrolytic Capacitors - SMD ROHS; Manufacturer: ROQANG; Manufacturer Part Number: RVT1C470M0505; Package: SMD,D5xL5.4mm; LCSC Part Number: C72515; Item Type: Capacitor; ComponentLink1Description: LCSC; ComponentLink1URL: https://www.lcsc.com/product-detail/Aluminum-Electrolytic-Capacitors-span-style-background-color-ff0-SMD-span_ROQANG-RVT1C470M0505_C72515.html
footprint RVT1C470M0505
pins: 1, 2

## RVT1C471M0607
designator C?, comment 470uF
470uF 16V ±20% SMD,D6.3xL7.7mm Aluminum Electrolytic Capacitors - SMD ROHS; Manufacturer: ROQANG; Manufacturer Part Number: RVT1C471M0607; Package: SMD,D6.3xL7.7mm; LCSC Part Number: C2977552; Item Type: Capacitor; ComponentLink1Description: LCSC; ComponentLink1URL: https://www.lcsc.com/product-detail/Aluminum-Electrolytic-Capacitors-SMD_ROQANG-RVT1C471M0607_C2977552.html
footprint RVT1C471M0607
pins: 1, 2

## RVT1E100M0405
designator C?, comment 10uF
CAP ALUM 10uF 25V SMD; Manufacturer: ROQANG; Manufacturer Part Number: RVT1E100M0405; φD: 4mm; L: 5.4mm; Tolerance: ±20%; Item Type: Capacitor; Operating Temperature: -45℃~+105℃; Rated Voltage: 25V; Capacitance: 10uF; ComponentLink1Description: LCSC; ComponentLink1URL: https://www.lcsc.com/product-detail/Aluminum-Electrolytic-Capacitors-SMD_10uF-25V-20_C72484.html; LCSC Part Number: C970655
footprint RVT1E100M0405_ (10uF 25V 5.4mm SMD)
pins: 1, 2

## RVT1E330M0505
designator C?, comment 33uF
33uF 25V 30mA@120Hz ±20% SMD,D5xL5.4mm Aluminum Electrolytic Capacitors - SMD ROHS; Manufacturer: ROQANG; Manufacturer Part Number: RVT1E330M0505; Package: SMD,D5xL5.4mm; LCSC Part Number: C72507; Item Type: Capacitor; ComponentLink1Description: LCSC; ComponentLink1URL: https://www.lcsc.com/product-detail/Aluminum-Electrolytic-Capacitors-SMD_ROQANG-RVT1E330M0505_C72507.html
footprint RVT1E330M0505
pins: 1, 2

## RVT1E470M0505
designator C?, comment 47uF
47uF 25V 49mA@120Hz ±20% SMD,D5xL5.4mm Aluminum Electrolytic Capacitors - SMD ROHS; Manufacturer: ROQANG; Manufacturer Part Number: RVT1E470M0505; Package: SMD,D5xL5.4mm; LCSC Part Number: C2977553; Item Type: Capacitor; ComponentLink1Description: LCSC; ComponentLink1URL: https://www.lcsc.com/product-detail/Aluminum-Electrolytic-Capacitors-SMD_ROQANG-RVT1E470M0505_C2977553.html
footprint RVT1E470M0505
pins: 1, 2

## RVT1H1R0M0405
designator C?, comment 1uF
1uF 50V 8mA@120Hz ±20% SMD,D4xL5.4mm Aluminum Electrolytic Capacitors - SMD ROHS; Manufacturer: Roqang; Manufacturer Part Number: RVT1H1R0M0405; Supplier: LCSC; LCSC Part Number: C72491; RoHS: No
footprint RVT1H1R0M0405
pins: 1, 2

## RVT1H101M0607
designator C?, comment 100uF
100uF 50V ±20% SMD,D6.3xL7.7mm Aluminum Electrolytic Capacitors - SMD ROHS; Manufacturer: ROQANG; Manufacturer Part Number: RVT1H101M0607; Package: SMD,D6.3xL7.7mm; LCSC Part Number: C3151829; Item Type: Capacitor; ComponentLink1Description: LCSC; ComponentLink1URL: https://www.lcsc.com/product-detail/Aluminum-Electrolytic-Capacitors-SMD_ROQANG-RVT1H101M0607_C3151829.html
footprint RVT1H101M0607
pins: 1, 2

## RVT1H470M0607
designator C?, comment 47uF
47uF 50V 66mA@120Hz ±20% SMD,D6.3xL7.7mm Aluminum Electrolytic Capacitors - SMD ROHS; Manufacturer: ROQANG; Manufacturer Part Number: RVT1H470M0607; Package: SMD,D6.3xL7.7mm; LCSC Part Number: C72523; Item Type: Capacitor; ComponentLink1Description: LCSC; ComponentLink1URL: https://www.lcsc.com/product-detail/Aluminum-Electrolytic-Capacitors-SMD_ROQANG-RVT1H470M0607_C72523.html
footprint RVT1H470M0607
pins: 1, 2

## RVT1H680M0607
designator C?, comment 68uF
68uF 50V SMD,D6.3xL7.7mm Aluminum Electrolytic Capacitors - SMD ROHS; Manufacturer: ROQANG; Manufacturer Part Number: RVT1H680M0607; Package: SMD,D6.3xL7.7mm; LCSC Part Number: C5221836; Item Type: Capacitor; ComponentLink1Description: LCSC; ComponentLink1URL: https://www.lcsc.com/product-detail/Aluminum-Electrolytic-Capacitors-SMD_ROQANG-RVT1H680M0607_C5221836.html
footprint RVT1H680M0607
pins: 1, 2

## RVT2A101M1213
designator C?, comment 100uF
100uF 100V 280mA@120Hz ±20% SMD,D12.5xL13.5mm Aluminum Electrolytic Capacitors - SMD ROHS; Manufacturer: ROQANG; Manufacturer Part Number: RVT2A101M1213; Package: SMD,D12.5xL13.5mm; LCSC Part Number: C2992302; Item Type: Capacitor
footprint RVT2A101M1213
pins: 1, 2
text: /

## RVT470UF50V34RV0133
designator C?, comment 470uF
470uF 50V 50mA@120Hz ±20% SMD,D12.5xL13.5mm Aluminum Electrolytic Capacitors - SMD ROHS; Manufacturer: KNSCHA; Manufacturer Part Number: RVT470UF50V34RV0133; Supplier: LCSC; LCSC Part Number: C2837182; RoHS: No; Item Type: Capacitor
footprint RVT470UF50V34RV0133
pins: 1, 2

## RXW470M1VBK-0611
designator C?, comment 47uF
47uF 35V 250mΩ@100kHz ±20% 290mA@100kHz Plugin,D6.3xL11mm Aluminum Electrolytic Capacitors - Leaded ROHS; Manufacturer: Lelon; Manufacturer Part Number: RXW470M1VBK-0611; Package: Plugin,D6.3xL11mm; LCSC Part Number: C134657; Item Type: Capacitor; ComponentLink1Description: LCSC; ComponentLink1URL: https://www.lcsc.com/product-detail/Aluminum-Electrolytic-Capacitors-Leaded_Lelon-RXW470M1VBK-0611_C134657.html?s_z=n_EEU-FC1V470
footprint RXW470M1VBK-0611
pins: 1, 2

## SC EB 5R5 474 M
designator C?, comment 0.47F
0.47F -20%~+80% 5.5V; Manufacturer: Wincap(Xingkai); Manufacturer Part Number: SC EB 5R5 474 M; Item Type: Super Capaciitor; Package: Custom; LCSC Part Number: C239004; ComponentLink1Description: LCSC; ComponentLink1URL: https://item.szlcsc.com/238113.html
footprint SC EB 5R5 474 M
pins: 1, 2

## SCCQ12B105PRB
designator C?, comment 1F
Supercapacitors / Ultracapacitors 2.7V 1F 6.3X12mm Radial Low ESR; Manufacturer: Kyocera AVX; Manufacturer Part Number: SCCQ12B105PRB; Tolerance: 100%; ESR (Equivalent Series Resistance): 200mR; Supplier: Arrow Electronics; Supplier Part Number: SCCQ12B105PRB; RoHS: Yes; Category: Capacitors; Stock: 91; Pricing: 1=1.5891, 10=1.0943, 25=1.0834, 50=1.0725, 100=0.8947, 500=0.5763 (USD); Mounting Technology: Through Hole; Case/Package: Radial; Min Operating Temperature: -40°C; Max Operating Temperature: 65°C; Packaging: Bulk; Value: 1F; Voltage Rating: 2.7V; Termination: PC Pins; Series: SCC; RoHS Compliant: Yes; ComponentLink1URL: http://datasheets.avx.com/AVX-SCC.pdf?src-supplier=Digikey; ComponentLink1Description: http://datasheets.avx.com/AVX-SCC.pdf?src-supplier=Digikey; Item Type: Supercapacitor
footprint SCCQ12B105PRB
pins: 1, 2

## SCCS30B106SRB
designator C?
Supercapacitors / Ultracapacitors 2.7V 10F 10X30mm Radial Low ESR; Manufacturer: Kyocera AVX; Manufacturer Part Number: SCCS30B106SRB; Supplier: Avnet; Supplier Part Number: SCCS30B106SRB; RoHS: Yes; Category: Capacitors; Pricing: 720=1.90418 (USD); RoHS Compliant: Yes; ComponentLink1URL: http://datasheets.avx.com/AVX-SCC.pdf?src-supplier=Digikey; ComponentLink1Description: http://datasheets.avx.com/AVX-SCC.pdf?src-supplier=Digikey; Item Type: Supercapacitor
footprint SCCS30B106SRB
pins: 1, 2